# Altium footprint library STC系列芯片.PcbLib: 60 footprints (part 1 of 4)
Each footprint in its own frame and in the unit in brackets; x right, y up, seen from the top. Pads: shape width x height; smd on the part's side, far side on the other; paste and mask are expansions set on the pad; w line width, h text height; cw(c..) or ccw(c..) is an arc to the next point about the centre after c.
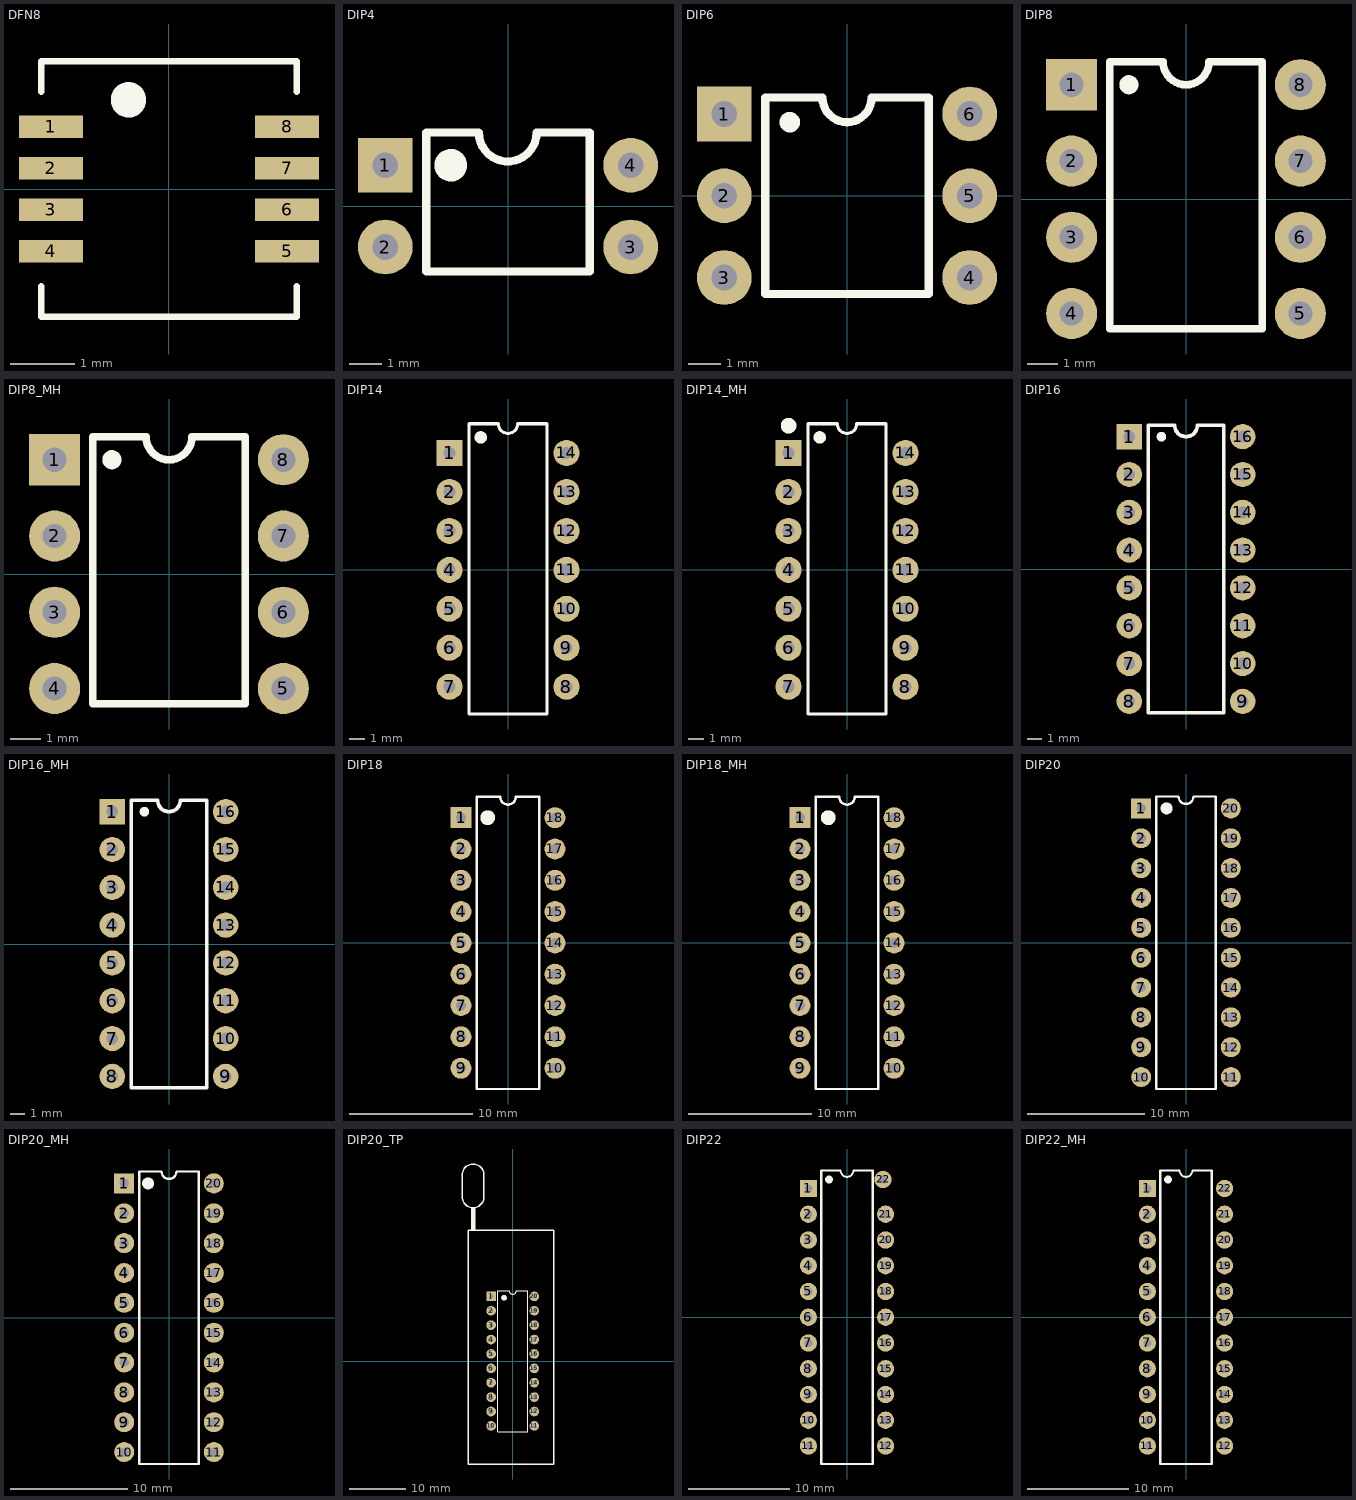
[diagram p0: the footprints below, top view; thin cyan lines are the x and y axes]

## DFN8 [mm]
pads (8):
  rect 1x0.35 smd: 1(-1.85,0.975) 2(-1.85,0.325) 3(-1.85,-0.325) 4(-1.85,-0.975) 5(1.85,-0.975) 6(1.85,-0.325) 7(1.85,0.325) 8(1.85,0.975)
Top Overlay:
  circle w0.3: c-0.635,1.397 r0.127
  lines w0.1: -2,-1.524 -2,-2 2,-2 2,-1.524 ; -2,1.524 -2,2 2,2 2,1.524

## DIP4 [mm]
pads (4):
  rect 1.7x1.7 hole 0.8: 1(-3.81,1.27)
  round 1.7 hole 0.8: 2(-3.81,-1.27) 3(3.81,-1.27) 4(3.81,1.27)
Top Overlay:
  circle w0.508: c-1.778,1.27 r0.254
  lines w0.254: -2.54,-2.032 -2.54,2.286 -0.907,2.286 ccw(c-0.009,2.286) 0.889,2.286 2.54,2.286 2.54,-2.032 -2.54,-2.032
3D body "DIP4.STEP": height 4.5, standoff -3.29, extent -3.937,-2.29 3.933,2.29

## DIP6 [mm]
pads (6):
  rect 1.7x1.7 hole 0.8: 1(-3.81,2.54)
  round 1.7 hole 0.8: 2(-3.81,0) 3(-3.81,-2.54) 4(3.81,-2.54) 5(3.81,0) 6(3.81,2.54)
Top Overlay:
  circle w0.381: c-1.778,2.286 r0.127
  lines w0.254: -2.54,-3.048 2.54,-3.048 2.54,3.048 0.762,3.048 cw(c0,3.048) 0,2.286 cw(c0,3.048) -0.762,3.048 -2.54,3.048 -2.54,-3.048
3D body "DIP6.STEP": height 4.5, standoff -3.2, extent -3.937,-3.303 3.913,3.557

## DIP8 [mm]
pads (8):
  rect 1.7x1.7 hole 0.8: 1(-3.81,3.81)
  round 1.7 hole 0.8: 2(-3.81,1.27) 3(-3.81,-1.27) 4(-3.81,-3.81) 5(3.81,-3.81) 6(3.81,-1.27) 7(3.81,1.27) 8(3.81,3.81)
Top Overlay:
  circle w0.381: c-1.905,3.81 r0.127
  lines w0.254: -2.54,-4.318 -2.54,4.572 -0.762,4.572 ccw(c0,4.572) 0,3.81 ccw(c0,4.572) 0.762,4.572 2.54,4.572 2.54,-4.318 -2.54,-4.318
3D body "DIP8.STEP": height 4.5, standoff -3.2, extent -3.937,-4.7 3.913,4.7

## DIP8_MH [mm]
pads (8):
  rect 1.7x1.7 hole 0.8: 1(-3.81,3.81)
  round 1.7 hole 0.8: 2(-3.81,1.27) 3(-3.81,-1.27) 4(-3.81,-3.81) 5(3.81,-3.81) 6(3.81,-1.27) 7(3.81,1.27) 8(3.81,3.81)
Top Overlay:
  circle w0.381: c-1.905,3.81 r0.127
  lines w0.254: -2.54,-4.318 2.54,-4.318 2.54,4.572 0.762,4.572 cw(c0,4.572) 0,3.81 cw(c0,4.572) -0.762,4.572 -2.54,4.572 -2.54,-4.318
3D body "DIP8_MH.STEP": height 4.95, standoff -2.95, extent -4.953,-5.19 5.047,5.19
3D body "DIP8.STEP": height 7.55, standoff -0.15, extent -3.798,-4.699 4.052,4.701

## DIP14 [mm]
pads (14):
  rect 1.7x1.7 hole 0.8: 1(-3.81,7.62)
  round 1.7 hole 0.8: 2(-3.81,5.08) 3(-3.81,2.54) 4(-3.81,0) 5(-3.81,-2.54) 6(-3.81,-5.08) 7(-3.81,-7.62) 8(3.81,-7.62) 9(3.81,-5.08) 10(3.81,-2.54) 11(3.81,0) 12(3.81,2.54) 13(3.81,5.08) 14(3.81,7.62)
Top Overlay:
  circle w0.6: c-1.778,8.636 r0.1
  lines w0.2: -2.54,-9.398 2.54,-9.398 2.54,9.525 0.635,9.525 cw(c0,9.525) -0.635,9.525 -2.54,9.525 -2.54,-9.398
3D body "DIP14.STEP": height 4.1, standoff -3.34, extent -3.98,-9.602 3.98,9.398

## DIP14_MH [mm]
pads (14):
  rect 1.7x1.7 hole 0.8: 1(-3.81,7.62)
  round 1.7 hole 0.8: 2(-3.81,5.08) 3(-3.81,2.54) 4(-3.81,0) 5(-3.81,-2.54) 6(-3.81,-5.08) 7(-3.81,-7.62) 8(3.81,-7.62) 9(3.81,-5.08) 10(3.81,-2.54) 11(3.81,0) 12(3.81,2.54) 13(3.81,5.08) 14(3.81,7.62)
Top Overlay:
  circle w0.508: c-3.81,9.398 r0.254
  circle w0.6: c-1.778,8.636 r0.1
  lines w0.2: -2.54,-9.398 2.54,-9.398 2.54,9.525 0.635,9.525 cw(c0,9.525) -0.635,9.525 -2.54,9.525 -2.54,-9.398
3D body "DIP14_MH.STEP": height 4.95, standoff -2.95, extent -5,-8.983 5,9.017
3D body "DIP14.STEP": height 7.4, standoff -0.04, extent -3.896,-9.627 4.064,9.373

## DIP16 [mm]
pads (16):
  rect 1.7x1.7 hole 0.8: 1(-3.81,8.89)
  round 1.7 hole 0.8: 2(-3.81,6.35) 3(-3.81,3.81) 4(-3.81,1.27) 5(-3.81,-1.27) 6(-3.81,-3.81) 7(-3.81,-6.35) 8(-3.81,-8.89) 9(3.81,-8.89) 10(3.81,-6.35) 11(3.81,-3.81) 12(3.81,-1.27) 13(3.81,1.27) 14(3.81,3.81) 15(3.81,6.35) 16(3.81,8.89)
Top Overlay:
  circle w0.381: c-1.651,8.89 r0.127
  lines w0.254: -2.54,-9.652 -2.54,9.652 -0.762,9.652 ccw(c0,9.652) 0,8.89 ccw(c0,9.652) 0.762,9.652 2.54,9.652 2.54,-9.652 -2.54,-9.652
3D body "DIP16.STEP": height 4.45, standoff -3.15, extent -4.02,-9.648 4.02,9.652

## DIP16_MH [mm]
pads (16):
  rect 1.7x1.7 hole 0.8: 1(-3.81,8.89)
  round 1.7 hole 0.8: 2(-3.81,6.35) 3(-3.81,3.81) 4(-3.81,1.27) 5(-3.81,-1.27) 6(-3.81,-3.81) 7(-3.81,-6.35) 8(-3.81,-8.89) 9(3.81,-8.89) 10(3.81,-6.35) 11(3.81,-3.81) 12(3.81,-1.27) 13(3.81,1.27) 14(3.81,3.81) 15(3.81,6.35) 16(3.81,8.89)
Top Overlay:
  circle w0.381: c-1.651,8.89 r0.127
  lines w0.254: -2.54,-9.652 2.54,-9.652 2.54,9.652 0.762,9.652 cw(c0,9.652) 0,8.89 cw(c0,9.652) -0.762,9.652 -2.54,9.652 -2.54,-9.652
3D body "DIP16.STEP": height 8.26, standoff 0.66, extent -3.849,-9.777 4.191,9.523
3D body "DIP16_MH.STEP": height 5.25, standoff -2.95, extent -4.991,-10.34 4.991,10.16

## DIP18 [mm]
pads (18):
  rect 1.7x1.7 hole 0.8: 1(-3.81,10.16)
  round 1.7 hole 0.8: 2(-3.81,7.62) 3(-3.81,5.08) 4(-3.81,2.54) 5(-3.81,0) 6(-3.81,-2.54) 7(-3.81,-5.08) 8(-3.81,-7.62) 9(-3.81,-10.16) 10(3.81,-10.16) 11(3.81,-7.62) 12(3.81,-5.08) 13(3.81,-2.54) 14(3.81,0) 15(3.81,2.54) 16(3.81,5.08) 17(3.81,7.62) 18(3.81,10.16)
Top Overlay:
  circle w0.6: c-1.651,10.16 r0.3
  lines w0.2: -2.54,-11.85 2.54,-11.85 2.54,11.85 0.635,11.85 cw(c0,11.85) -0.635,11.85 -2.54,11.85 -2.54,-11.85
3D body "DIP18.STEP": height 4.35, standoff -3.09, extent -4,-11.543 4,11.557

## DIP18_MH [mm]
pads (18):
  rect 1.7x1.7 hole 0.8: 1(-3.81,10.16)
  round 1.7 hole 0.8: 2(-3.81,7.62) 3(-3.81,5.08) 4(-3.81,2.54) 5(-3.81,0) 6(-3.81,-2.54) 7(-3.81,-5.08) 8(-3.81,-7.62) 9(-3.81,-10.16) 10(3.81,-10.16) 11(3.81,-7.62) 12(3.81,-5.08) 13(3.81,-2.54) 14(3.81,0) 15(3.81,2.54) 16(3.81,5.08) 17(3.81,7.62) 18(3.81,10.16)
Top Overlay:
  circle w0.6: c-1.524,10.16 r0.3
  lines w0.2: -2.54,-11.85 2.54,-11.85 2.54,11.85 0.635,11.85 cw(c0,11.85) -0.635,11.85 -2.54,11.85 -2.54,-11.85
3D body "DIP18_MH.STEP": height 5.25, standoff -2.95, extent -4.991,-11.61 4.991,11.43
3D body "DIP18.STEP": height 7.4, standoff -0.05, extent -4,-11.67 4,11.43

## DIP20 [mm]
pads (20):
  rect 1.7x1.7 hole 0.8: 1(-3.81,11.43)
  round 1.7 hole 0.8: 2(-3.81,8.89) 3(-3.81,6.35) 4(-3.81,3.81) 5(-3.81,1.27) 6(-3.81,-1.27) 7(-3.81,-3.81) 8(-3.81,-6.35) 9(-3.81,-8.89) 10(-3.81,-11.43) 11(3.81,-11.43) 12(3.81,-8.89) 13(3.81,-6.35) 14(3.81,-3.81) 15(3.81,-1.27) 16(3.81,1.27) 17(3.81,3.81) 18(3.81,6.35) 19(3.81,8.89) 20(3.81,11.43)
Top Overlay:
  circle w0.508: c-1.651,11.43 r0.254
  lines w0.2: -2.54,-12.446 2.54,-12.446 2.54,12.446 0.635,12.446 cw(c0,12.446) -0.635,12.446 -2.54,12.446 -2.54,-12.446
3D body "DIP20.STEP": height 4.54, standoff -3.26, extent -4,-13.192 4,13.208

## DIP20_MH [mm]
pads (20):
  rect 1.7x1.7 hole 0.8: 1(-3.81,11.43)
  round 1.7 hole 0.8: 2(-3.81,8.89) 3(-3.81,6.35) 4(-3.81,3.81) 5(-3.81,1.27) 6(-3.81,-1.27) 7(-3.81,-3.81) 8(-3.81,-6.35) 9(-3.81,-8.89) 10(-3.81,-11.43) 11(3.81,-11.43) 12(3.81,-8.89) 13(3.81,-6.35) 14(3.81,-3.81) 15(3.81,-1.27) 16(3.81,1.27) 17(3.81,3.81) 18(3.81,6.35) 19(3.81,8.89) 20(3.81,11.43)
Top Overlay:
  circle w0.508: c-1.778,11.43 r0.254
  lines w0.2: -2.54,-12.446 -2.54,12.446 -0.635,12.446 ccw(c0,12.446) 0.635,12.446 2.54,12.446 2.54,-12.446 -2.54,-12.446
3D body "DIP20_MH.STEP": height 5.25, standoff -2.95, extent -4.99,-12.88 4.99,12.7
3D body "DIP20.STEP": height 8.1, standoff 0.29, extent -4,-13.446 4,12.954

## DIP20_TP [mm] "41*15*10.5(长宽高）"
pads (20):
  rect 1.7x1.7 hole 0.8: 1(-3.81,11.43)
  round 1.7 hole 0.8: 2(-3.81,8.89) 3(-3.81,6.35) 4(-3.81,3.81) 5(-3.81,1.27) 6(-3.81,-1.27) 7(-3.81,-3.81) 8(-3.81,-6.35) 9(-3.81,-8.89) 10(-3.81,-11.43) 11(3.81,-11.43) 12(3.81,-8.89) 13(3.81,-6.35) 14(3.81,-3.81) 15(3.81,-1.27) 16(3.81,1.27) 17(3.81,3.81) 18(3.81,6.35) 19(3.81,8.89) 20(3.81,11.43)
Top Overlay:
  circle w0.508: c-1.524,11.176 r0.254
  rectangle: -7.366,23.114 -6.604,27.051
  lines w0.2: -2.65,-12.446 -2.65,12.446 -0.635,12.446 ccw(c0,12.446) 0.635,12.446 2.65,12.446 2.65,-12.446 -2.65,-12.446
  lines w0.254: -8.89,28.956 ccw(c-6.985,28.956) -5.08,28.956 -5.08,32.893 ccw(c-6.985,32.893) -8.89,32.893 -8.89,28.956 ; -7.874,-18.161 7.239,-18.161 7.239,23.114 -7.874,23.114 -7.874,-18.161
3D body "DIP20_TP.STEP": height 11.15, standoff -3.15, extent -9.271,-18.145 7.079,34.655
3D body "DIP20.STEP": height 15.72, standoff 7.91, extent -4.572,-13.835 3.428,12.565

## DIP22 [mm]
pads (22):
  rect 1.7x1.7 hole 0.8: 1(-3.81,12.7)
  round 1.7 hole 0.8: 2(-3.81,10.16) 3(-3.81,7.62) 4(-3.81,5.08) 5(-3.81,2.54) 6(-3.81,0) 7(-3.81,-2.54) 8(-3.81,-5.08) 9(-3.81,-7.62) 10(-3.81,-10.16) 11(-3.81,-12.7) 12(3.81,-12.7) 13(3.81,-10.16) 14(3.81,-7.62) 15(3.81,-5.08) 16(3.81,-2.54) 17(3.81,0) 18(3.81,2.54) 19(3.81,5.08) 20(3.81,7.62) 21(3.81,10.16) 22(3.556,13.589)
Top Overlay:
  circle w0.508: c-1.778,13.578 r0.127
  lines w0.2: -2.54,-14.478 2.54,-14.478 2.54,14.478 0.635,14.478 cw(c0,14.478) -0.635,14.478 -2.54,14.478 -2.54,-14.478
3D body "DIP22.STEP": height 4.25, standoff -3.19, extent -3.95,-14.589 3.95,14.351

## DIP22_MH [mm]
pads (22):
  rect 1.7x1.7 hole 0.8: 1(-3.81,12.7)
  round 1.7 hole 0.8: 2(-3.81,10.16) 3(-3.81,7.62) 4(-3.81,5.08) 5(-3.81,2.54) 6(-3.81,0) 7(-3.81,-2.54) 8(-3.81,-5.08) 9(-3.81,-7.62) 10(-3.81,-10.16) 11(-3.81,-12.7) 12(3.81,-12.7) 13(3.81,-10.16) 14(3.81,-7.62) 15(3.81,-5.08) 16(3.81,-2.54) 17(3.81,0) 18(3.81,2.54) 19(3.81,5.08) 20(3.81,7.62) 21(3.81,10.16) 22(3.81,12.7)
Top Overlay:
  circle w0.508: c-1.778,13.578 r0.127
  lines w0.2: -2.54,-14.478 -2.54,14.478 -0.635,14.478 ccw(c0,14.478) 0.635,14.478 2.54,14.478 2.54,-14.478 -2.54,-14.478
3D body "DIP22_MH.STEP": height 5.25, standoff -2.95, extent -4.991,-14.15 4.991,13.97
3D body "DIP22.STEP": height 7.55, standoff 0.11, extent -4.077,-14.605 3.823,14.335